# Altium footprint library RPR220.PcbLib: 1 footprints
Each footprint in its own frame and in the unit in brackets; x right, y up, seen from the top. Pads: shape width x height; smd on the part's side, far side on the other; paste and mask are expansions set on the pad; w line width, h text height; cw(c..) or ccw(c..) is an arc to the next point about the centre after c.
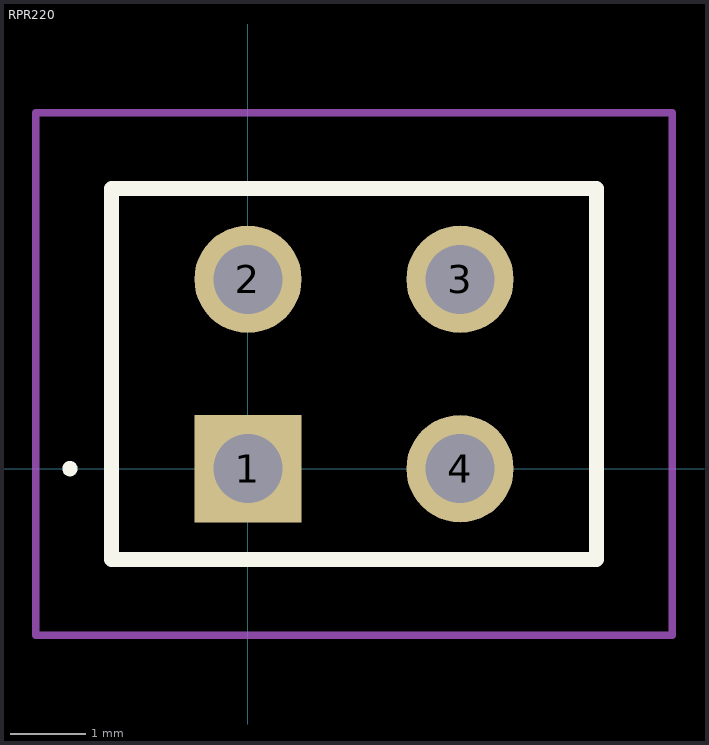
[diagram p0: the footprint, top view; thin cyan lines are the x and y axes]

## RPR220 [mm]
pads (4):
  rect 1.416x1.416 hole 0.91: 1(0,0)
  round 1.416 hole 0.91: 2(0,2.5) 3(2.8,2.5) 4(2.8,0)
Top Overlay:
  lines w0.1: -2.4,0 cw(c-2.35,0) -2.3,0 ; -2.4,0 -2.4,0 ; -2.4,0 ccw(c-2.35,0) -2.3,0 ; -2.3,0 -2.3,0
  lines w0.2: -1.8,-1.2 4.6,-1.2 4.6,3.7 -1.8,3.7 -1.8,-1.2
Mechanical 15:
  lines w0.1: -1.8,-1.2 4.6,-1.2 4.6,3.7 -1.8,3.7 -1.8,-1.2
Mechanical 20:
  lines w0.1: -2.8,-2.2 5.6,-2.2 5.6,4.7 -2.8,4.7 -2.8,-2.2